# Altium schematic symbol library 732-2389-2-ND.SchLib: 1 symbol
Pins are listed as number, name and electrical type; pins without a type are passive.

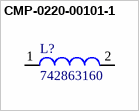
[diagram p0: symbol CMP-0220-00101-1]

## CMP-0220-00101-1
designator L?, comment 742863160
SMD EMI Suppression Ferrite Bead WE-CBF HF, Z = 600 Ohm; Impedance: 600 Ohm; PackageDescription: Chip Inductor, 2-Leads, Body 1.6 x 0.8 mm; PackageReference: SMD-0603; DatasheetVersion: ver 2, Aug-2009; ComponentLink1URL: http://www.we-online.com; ComponentLink2URL: http://www.we-online.de/katalog/media/pdf/742863160.pdf; ComponentLink2Description: Datasheet; ComponentLink1Description: Manufacturer Link; PackageVersion: 2009
footprint SMD-0603 (Chip Inductor, 2-Leads, Body 1.6x0.8mm)
pins: 1, 2